# Altium footprint library Miscellaneous Header.PcbLib: 164 footprints (part 2 of 11)
Each footprint in its own frame and in the unit in brackets; x right, y up, seen from the top. Pads: shape width x height; smd on the part's side, far side on the other; paste and mask are expansions set on the pad; w line width, h text height; cw(c..) or ccw(c..) is an arc to the next point about the centre after c.
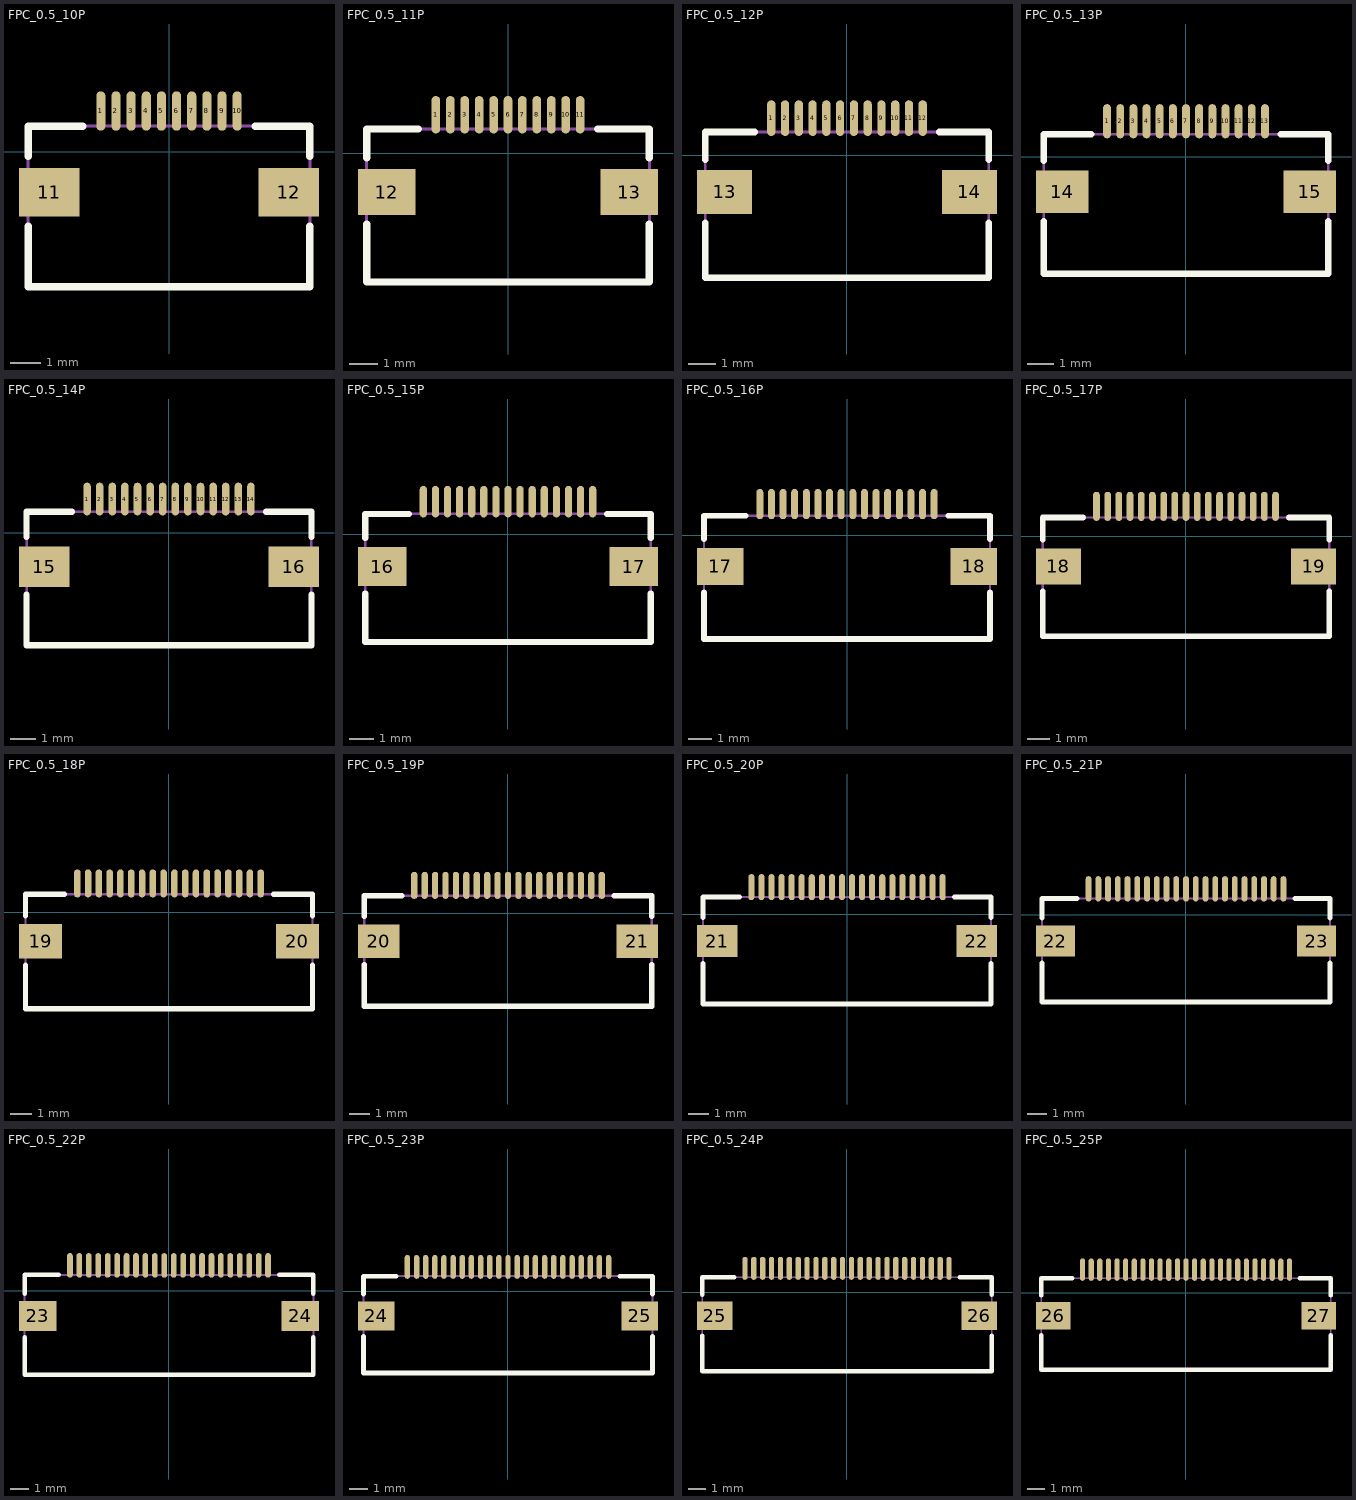
[diagram p1: the footprints below, top view; thin cyan lines are the x and y axes]

## FPC_0.5_10P [mm]
pads (12):
  oval 0.3x1.3 smd: 1(-2.25,1.34) 2(-1.75,1.34) 3(-1.25,1.34) 4(-0.75,1.34) 5(-0.25,1.34) 6(0.25,1.34) 7(0.75,1.34) 8(1.25,1.34) 9(1.75,1.34) 10(2.25,1.34)
  rect 2x1.6 smd: 11(-3.95,-1.34) 12(3.95,-1.34)
Top Overlay:
  lines w0.25: -4.65,-2.46 -4.65,-4.46 4.65,-4.46 4.65,-2.46 ; -4.65,-0.16 -4.65,0.84 -2.85,0.84 ; 2.85,0.84 4.65,0.84 4.65,-0.16
Mechanical 15:
  lines w0.1: -4.65,-4.46 4.65,-4.46 4.65,0.84 -4.65,0.84 -4.65,-4.46
3D body: height 2.2, standoff -0.05, extent -4.55,-4.799 4.55,1.7

## FPC_0.5_11P [mm]
pads (13):
  oval 0.3x1.3 smd: 1(-2.5,1.34) 2(-2,1.34) 3(-1.5,1.34) 4(-1,1.34) 5(-0.5,1.34) 6(0,1.34) 7(0.5,1.34) 8(1,1.34) 9(1.5,1.34) 10(2,1.34) 11(2.5,1.34)
  rect 2x1.6 smd: 12(-4.2,-1.34) 13(4.2,-1.34)
Top Overlay:
  lines w0.25: -4.9,-2.46 -4.9,-4.46 4.9,-4.46 4.9,-2.46 ; -4.9,-0.16 -4.9,0.84 -3.1,0.84 ; 3.1,0.84 4.9,0.84 4.9,-0.16
Mechanical 15:
  lines w0.1: -4.9,-4.46 -4.9,0.84 4.9,0.84 4.9,-4.46 -4.9,-4.46
3D body: height 2.2, standoff -0.05, extent -4.8,-4.799 4.8,1.7

## FPC_0.5_12P [mm]
pads (14):
  oval 0.3x1.3 smd: 1(-2.75,1.34) 2(-2.25,1.34) 3(-1.75,1.34) 4(-1.25,1.34) 5(-0.75,1.34) 6(-0.25,1.34) 7(0.25,1.34) 8(0.75,1.34) 9(1.25,1.34) 10(1.75,1.34) 11(2.25,1.34) 12(2.75,1.34)
  rect 2x1.6 smd: 13(-4.45,-1.34) 14(4.45,-1.34)
Top Overlay:
  lines w0.25: -5.15,-2.46 -5.15,-4.46 5.15,-4.46 5.15,-2.46 ; -5.15,-0.16 -5.15,0.84 -3.35,0.84 ; 3.35,0.84 5.15,0.84 5.15,-0.16
Mechanical 15:
  lines w0.1: -5.15,-4.46 5.15,-4.46 5.15,0.84 -5.15,0.84 -5.15,-4.46
3D body: height 2.2, standoff -0.05, extent -5.05,-4.799 5.05,1.7

## FPC_0.5_13P [mm]
pads (15):
  oval 0.3x1.3 smd: 1(-3,1.34) 2(-2.5,1.34) 3(-2,1.34) 4(-1.5,1.34) 5(-1,1.34) 6(-0.5,1.34) 7(0,1.34) 8(0.5,1.34) 9(1,1.34) 10(1.5,1.34) 11(2,1.34) 12(2.5,1.34) 13(3,1.34)
  rect 2x1.6 smd: 14(-4.7,-1.34) 15(4.7,-1.34)
Top Overlay:
  lines w0.25: -5.4,-2.46 -5.4,-4.46 5.4,-4.46 5.4,-2.46 ; -5.4,-0.16 -5.4,0.84 -3.6,0.84 ; 3.6,0.84 5.4,0.84 5.4,-0.16
Mechanical 15:
  lines w0.1: -5.4,-4.46 5.4,-4.46 5.4,0.84 -5.4,0.84 -5.4,-4.46
3D body: height 2.2, standoff -0.05, extent -5.3,-4.799 5.3,1.7

## FPC_0.5_14P [mm]
pads (16):
  oval 0.3x1.3 smd: 1(-3.25,1.34) 2(-2.75,1.34) 3(-2.25,1.34) 4(-1.75,1.34) 5(-1.25,1.34) 6(-0.75,1.34) 7(-0.25,1.34) 8(0.25,1.34) 9(0.75,1.34) 10(1.25,1.34) 11(1.75,1.34) 12(2.25,1.34) 13(2.75,1.34) 14(3.25,1.34)
  rect 2x1.6 smd: 15(-4.95,-1.34) 16(4.95,-1.34)
Top Overlay:
  lines w0.25: -5.65,-2.46 -5.65,-4.46 5.65,-4.46 5.65,-2.46 ; -5.65,-0.16 -5.65,0.84 -3.85,0.84 ; 3.85,0.84 5.65,0.84 5.65,-0.16
Mechanical 15:
  lines w0.1: -5.65,-4.46 -5.65,0.84 5.65,0.84 5.65,-4.46 -5.65,-4.46
3D body: height 2.2, standoff -0.05, extent -5.55,-4.799 5.55,1.7

## FPC_0.5_15P [mm]
pads (17):
  oval 0.3x1.3 smd: 1(-3.5,1.34) 2(-3,1.34) 3(-2.5,1.34) 4(-2,1.34) 5(-1.5,1.34) 6(-1,1.34) 7(-0.5,1.34) 8(0,1.34) 9(0.5,1.34) 10(1,1.34) 11(1.5,1.34) 12(2,1.34) 13(2.5,1.34) 14(3,1.34) 15(3.5,1.34)
  rect 2x1.6 smd: 16(-5.2,-1.34) 17(5.2,-1.34)
Top Overlay:
  lines w0.25: -5.9,-2.46 -5.9,-4.46 5.9,-4.46 5.9,-2.46 ; -5.9,-0.16 -5.9,0.84 -4.1,0.84 ; 4.1,0.84 5.9,0.84 5.9,-0.16
Mechanical 15:
  lines w0.1: -5.9,-4.46 -5.9,0.84 5.9,0.84 5.9,-4.46 -5.9,-4.46
3D body: height 2.2, standoff -0.05, extent -5.8,-4.799 5.8,1.7

## FPC_0.5_16P [mm]
pads (18):
  oval 0.3x1.3 smd: 1(-3.75,1.34) 2(-3.25,1.34) 3(-2.75,1.34) 4(-2.25,1.34) 5(-1.75,1.34) 6(-1.25,1.34) 7(-0.75,1.34) 8(-0.25,1.34) 9(0.25,1.34) 10(0.75,1.34) 11(1.25,1.34) 12(1.75,1.34) 13(2.25,1.34) 14(2.75,1.34) 15(3.25,1.34) 16(3.75,1.34)
  rect 2x1.6 smd: 17(-5.45,-1.34) 18(5.45,-1.34)
Top Overlay:
  lines w0.25: -6.15,-2.46 -6.15,-4.46 6.15,-4.46 6.15,-2.46 ; -6.15,-0.16 -6.15,0.84 -4.35,0.84 ; 4.35,0.84 6.15,0.84 6.15,-0.16
Mechanical 15:
  lines w0.1: -6.15,-4.46 6.15,-4.46 6.15,0.84 -6.15,0.84 -6.15,-4.46
3D body: height 2.2, standoff -0.05, extent -6.05,-4.799 6.05,1.7

## FPC_0.5_17P [mm]
pads (19):
  oval 0.3x1.3 smd: 1(-4,1.34) 2(-3.5,1.34) 3(-3,1.34) 4(-2.5,1.34) 5(-2,1.34) 6(-1.5,1.34) 7(-1,1.34) 8(-0.5,1.34) 9(0,1.34) 10(0.5,1.34) 11(1,1.34) 12(1.5,1.34) 13(2,1.34) 14(2.5,1.34) 15(3,1.34) 16(3.5,1.34) 17(4,1.34)
  rect 2x1.6 smd: 18(-5.7,-1.34) 19(5.7,-1.34)
Top Overlay:
  lines w0.25: -6.4,-2.46 -6.4,-4.46 6.4,-4.46 6.4,-2.46 ; -6.4,-0.16 -6.4,0.84 -4.6,0.84 ; 4.6,0.84 6.4,0.84 6.4,-0.16
Mechanical 15:
  lines w0.1: -6.4,-4.46 -6.4,0.84 6.4,0.84 6.4,-4.46 -6.4,-4.46
3D body: height 2.2, standoff -0.05, extent -6.3,-4.799 6.3,1.7

## FPC_0.5_18P [mm]
pads (20):
  oval 0.3x1.3 smd: 1(-4.25,1.34) 2(-3.75,1.34) 3(-3.25,1.34) 4(-2.75,1.34) 5(-2.25,1.34) 6(-1.75,1.34) 7(-1.25,1.34) 8(-0.75,1.34) 9(-0.25,1.34) 10(0.25,1.34) 11(0.75,1.34) 12(1.25,1.34) 13(1.75,1.34) 14(2.25,1.34) 15(2.75,1.34) 16(3.25,1.34) 17(3.75,1.34) 18(4.25,1.34)
  rect 2x1.6 smd: 19(-5.95,-1.34) 20(5.95,-1.34)
Top Overlay:
  lines w0.25: -6.65,-2.46 -6.65,-4.46 6.65,-4.46 6.65,-2.46 ; -6.65,-0.16 -6.65,0.84 -4.85,0.84 ; 4.85,0.84 6.65,0.84 6.65,-0.16
Mechanical 15:
  lines w0.1: -6.65,-4.46 6.65,-4.46 6.65,0.84 -6.65,0.84 -6.65,-4.46
3D body: height 2.2, standoff -0.05, extent -6.55,-4.799 6.55,1.7

## FPC_0.5_19P [mm]
pads (21):
  oval 0.3x1.3 smd: 1(-4.5,1.34) 2(-4,1.34) 3(-3.5,1.34) 4(-3,1.34) 5(-2.5,1.34) 6(-2,1.34) 7(-1.5,1.34) 8(-1,1.34) 9(-0.5,1.34) 10(0,1.34) 11(0.5,1.34) 12(1,1.34) 13(1.5,1.34) 14(2,1.34) 15(2.5,1.34) 16(3,1.34) 17(3.5,1.34) 18(4,1.34) 19(4.5,1.34)
  rect 2x1.6 smd: 20(-6.2,-1.34) 21(6.2,-1.34)
Top Overlay:
  lines w0.25: -6.9,-2.46 -6.9,-4.46 6.9,-4.46 6.9,-2.46 ; -6.9,-0.16 -6.9,0.84 -5.1,0.84 ; 5.1,0.84 6.9,0.84 6.9,-0.16
Mechanical 15:
  lines w0.1: -6.9,-4.46 -6.9,0.84 6.9,0.84 6.9,-4.46 -6.9,-4.46
3D body: height 2.2, standoff -0.05, extent -6.8,-4.799 6.8,1.7

## FPC_0.5_20P [mm]
pads (22):
  oval 0.3x1.3 smd: 1(-4.75,1.34) 2(-4.25,1.34) 3(-3.75,1.34) 4(-3.25,1.34) 5(-2.75,1.34) 6(-2.25,1.34) 7(-1.75,1.34) 8(-1.25,1.34) 9(-0.75,1.34) 10(-0.25,1.34) 11(0.25,1.34) 12(0.75,1.34) 13(1.25,1.34) 14(1.75,1.34) 15(2.25,1.34) 16(2.75,1.34) 17(3.25,1.34) 18(3.75,1.34) 19(4.25,1.34) 20(4.75,1.34)
  rect 2x1.6 smd: 21(-6.45,-1.34) 22(6.45,-1.34)
Top Overlay:
  lines w0.25: -7.15,-2.46 -7.15,-4.46 7.15,-4.46 7.15,-2.46 ; -7.15,-0.16 -7.15,0.84 -5.35,0.84 ; 5.35,0.84 7.15,0.84 7.15,-0.16
Mechanical 15:
  lines w0.1: -7.15,-4.46 7.15,-4.46 7.15,0.84 -7.15,0.84 -7.15,-4.46
3D body: height 2.2, standoff -0.05, extent -7.05,-4.799 7.05,1.7

## FPC_0.5_21P [mm]
pads (23):
  oval 0.3x1.3 smd: 1(-5,1.34) 2(-4.5,1.34) 3(-4,1.34) 4(-3.5,1.34) 5(-3,1.34) 6(-2.5,1.34) 7(-2,1.34) 8(-1.5,1.34) 9(-1,1.34) 10(-0.5,1.34) 11(0,1.34) 12(0.5,1.34) 13(1,1.34) 14(1.5,1.34) 15(2,1.34) 16(2.5,1.34) 17(3,1.34) 18(3.5,1.34) 19(4,1.34) 20(4.5,1.34) 21(5,1.34)
  rect 2x1.6 smd: 22(-6.7,-1.34) 23(6.7,-1.34)
Top Overlay:
  lines w0.25: -7.4,-2.46 -7.4,-4.46 7.4,-4.46 7.4,-2.46 ; -7.4,-0.16 -7.4,0.84 -5.6,0.84 ; 5.6,0.84 7.4,0.84 7.4,-0.16
Mechanical 15:
  lines w0.1: -7.4,-4.46 -7.4,0.84 7.4,0.84 7.4,-4.46 -7.4,-4.46
3D body: height 2.2, standoff -0.05, extent -7.3,-4.799 7.3,1.7

## FPC_0.5_22P [mm]
pads (24):
  oval 0.3x1.3 smd: 1(-5.25,1.34) 2(-4.75,1.34) 3(-4.25,1.34) 4(-3.75,1.34) 5(-3.25,1.34) 6(-2.75,1.34) 7(-2.25,1.34) 8(-1.75,1.34) 9(-1.25,1.34) 10(-0.75,1.34) 11(-0.25,1.34) 12(0.25,1.34) 13(0.75,1.34) 14(1.25,1.34) 15(1.75,1.34) 16(2.25,1.34) 17(2.75,1.34) 18(3.25,1.34) 19(3.75,1.34) 20(4.25,1.34) 21(4.75,1.34) 22(5.25,1.34)
  rect 2x1.6 smd: 23(-6.95,-1.34) 24(6.95,-1.34)
Top Overlay:
  lines w0.25: -7.65,-2.46 -7.65,-4.46 7.65,-4.46 7.65,-2.46 ; -7.65,-0.16 -7.65,0.84 -5.85,0.84 ; 5.85,0.84 7.65,0.84 7.65,-0.16
Mechanical 15:
  lines w0.1: -7.65,-4.46 7.65,-4.46 7.65,0.84 -7.65,0.84 -7.65,-4.46
3D body: height 2.2, standoff -0.05, extent -7.55,-4.799 7.55,1.7

## FPC_0.5_23P [mm]
pads (25):
  oval 0.3x1.3 smd: 1(-5.5,1.34) 2(-5,1.34) 3(-4.5,1.34) 4(-4,1.34) 5(-3.5,1.34) 6(-3,1.34) 7(-2.5,1.34) 8(-2,1.34) 9(-1.5,1.34) 10(-1,1.34) 11(-0.5,1.34) 12(0,1.34) 13(0.5,1.34) 14(1,1.34) 15(1.5,1.34) 16(2,1.34) 17(2.5,1.34) 18(3,1.34) 19(3.5,1.34) 20(4,1.34) 21(4.5,1.34) 22(5,1.34) 23(5.5,1.34)
  rect 2x1.6 smd: 24(-7.2,-1.34) 25(7.2,-1.34)
Top Overlay:
  lines w0.25: -7.9,-2.46 -7.9,-4.46 7.9,-4.46 7.9,-2.46 ; -7.9,-0.16 -7.9,0.84 -6.1,0.84 ; 6.1,0.84 7.9,0.84 7.9,-0.16
Mechanical 15:
  lines w0.1: -7.9,-4.46 -7.9,0.84 7.9,0.84 7.9,-4.46 -7.9,-4.46
3D body: height 2.2, standoff -0.05, extent -7.8,-4.799 7.8,1.7

## FPC_0.5_24P [mm]
pads (26):
  oval 0.3x1.3 smd: 1(-5.75,1.34) 2(-5.25,1.34) 3(-4.75,1.34) 4(-4.25,1.34) 5(-3.75,1.34) 6(-3.25,1.34) 7(-2.75,1.34) 8(-2.25,1.34) 9(-1.75,1.34) 10(-1.25,1.34) 11(-0.75,1.34) 12(-0.25,1.34) 13(0.25,1.34) 14(0.75,1.34) 15(1.25,1.34) 16(1.75,1.34) 17(2.25,1.34) 18(2.75,1.34) 19(3.25,1.34) 20(3.75,1.34) 21(4.25,1.34) 22(4.75,1.34) 23(5.25,1.34) 24(5.75,1.34)
  rect 2x1.6 smd: 25(-7.45,-1.34) 26(7.45,-1.34)
Top Overlay:
  lines w0.25: -8.15,-2.46 -8.15,-4.46 8.15,-4.46 8.15,-2.46 ; -8.15,-0.16 -8.15,0.84 -6.35,0.84 ; 6.35,0.84 8.15,0.84 8.15,-0.16
Mechanical 15:
  lines w0.1: -8.15,-4.46 8.15,-4.46 8.15,0.84 -8.15,0.84 -8.15,-4.46
3D body: height 2.2, standoff -0.05, extent -8.05,-4.799 8.05,1.7

## FPC_0.5_25P [mm]
pads (27):
  oval 0.3x1.3 smd: 1(-6,1.34) 2(-5.5,1.34) 3(-5,1.34) 4(-4.5,1.34) 5(-4,1.34) 6(-3.5,1.34) 7(-3,1.34) 8(-2.5,1.34) 9(-2,1.34) 10(-1.5,1.34) 11(-1,1.34) 12(-0.5,1.34) 13(0,1.34) 14(0.5,1.34) 15(1,1.34) 16(1.5,1.34) 17(2,1.34) 18(2.5,1.34) 19(3,1.34) 20(3.5,1.34) 21(4,1.34) 22(4.5,1.34) 23(5,1.34) 24(5.5,1.34) 25(6,1.34)
  rect 2x1.6 smd: 26(-7.7,-1.34) 27(7.7,-1.34)
Top Overlay:
  lines w0.25: -8.4,-2.46 -8.4,-4.46 8.4,-4.46 8.4,-2.46 ; -8.4,-0.16 -8.4,0.84 -6.6,0.84 ; 6.6,0.84 8.4,0.84 8.4,-0.16
Mechanical 15:
  lines w0.1: -8.4,-4.46 -8.4,0.84 8.4,0.84 8.4,-4.46 -8.4,-4.46
3D body: height 2.2, standoff -0.05, extent -8.3,-4.799 8.3,1.7